# Altium footprint library FootPrintLib_10.PcbLib: 270 footprints (part 16 of 17)
Each footprint in its own frame and in the unit in brackets; x right, y up, seen from the top. Pads: shape width x height; smd on the part's side, far side on the other; paste and mask are expansions set on the pad; w line width, h text height; cw(c..) or ccw(c..) is an arc to the next point about the centre after c.
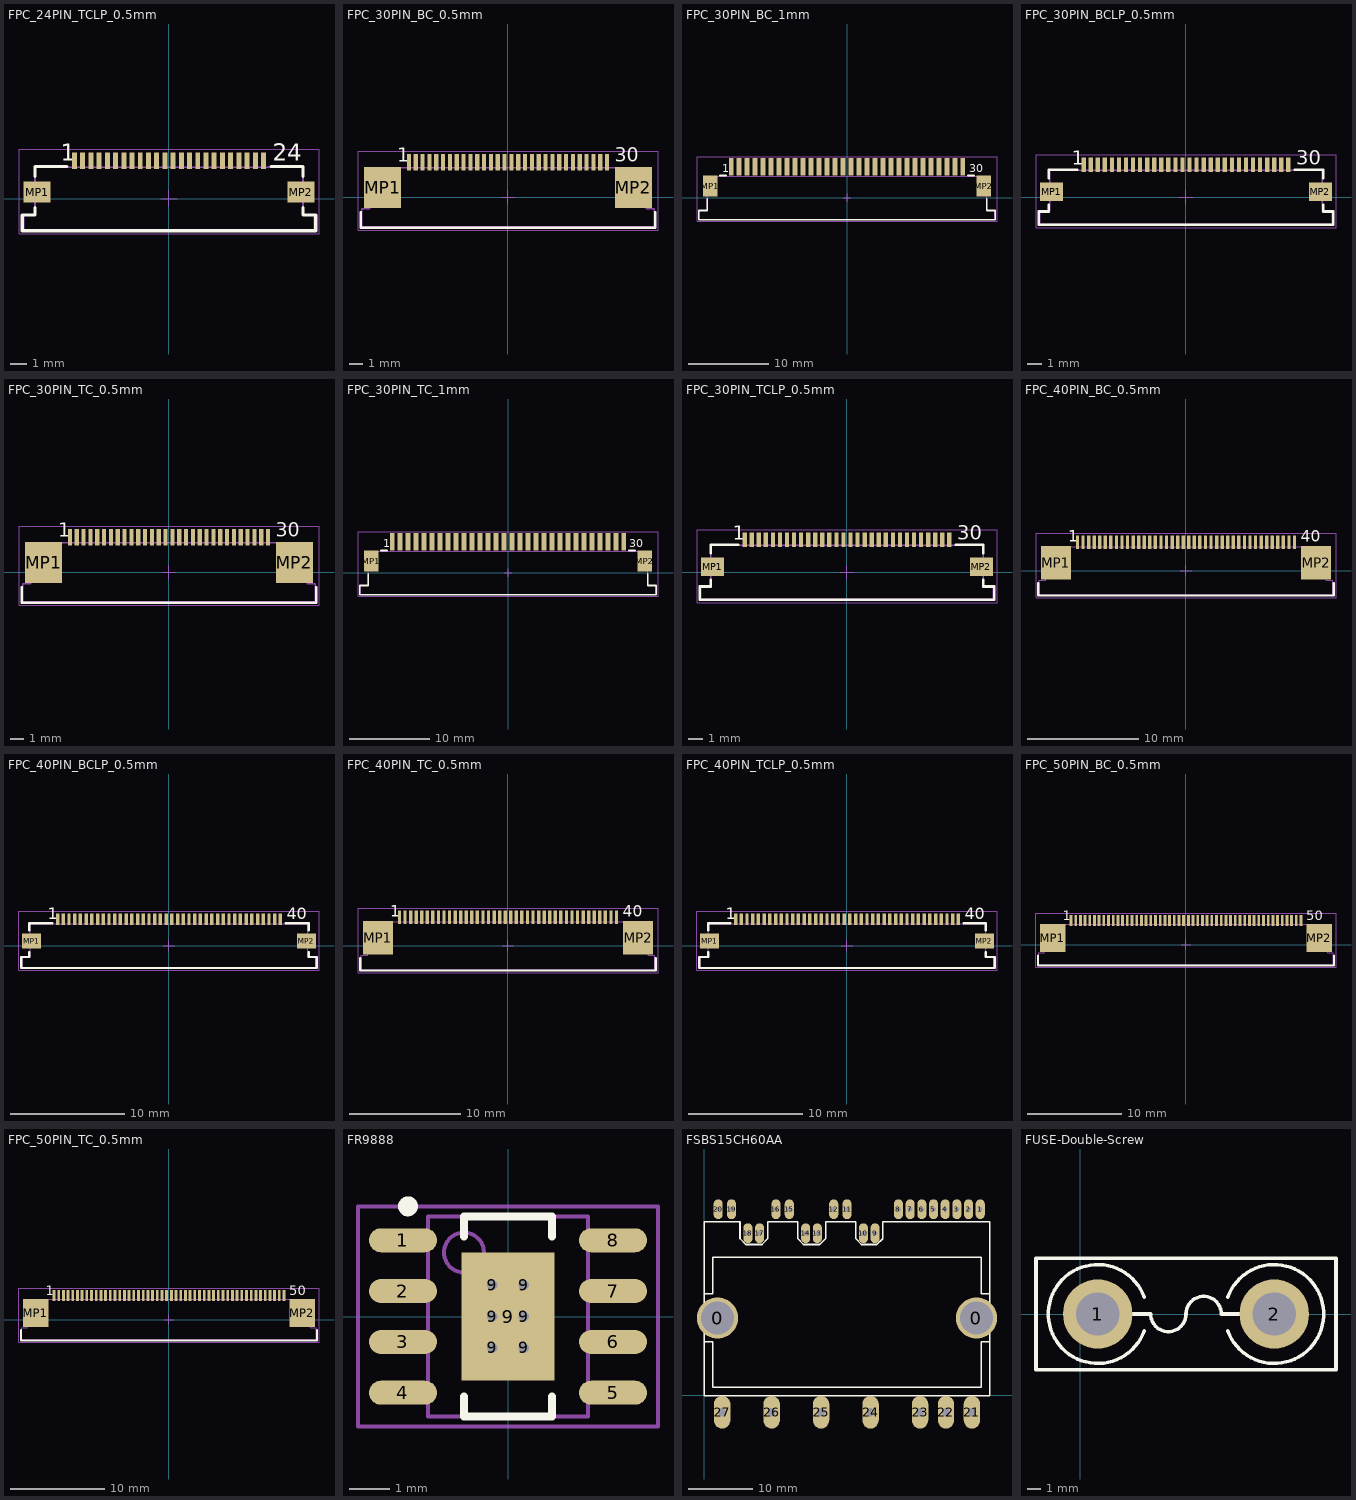
[diagram p15: the footprints below, top view; thin cyan lines are the x and y axes]

## FPC_24PIN_TCLP_0.5mm [mm] "ZIF Connectors, Horizontal, Top Contact Low Profile, pitch 0.5mm, 24p"
height 1.3
pads (26):
  rect 0.3x1 smd: 1(-5.75,2.3) 2(-5.25,2.3) 3(-4.75,2.3) 4(-4.25,2.3) 5(-3.75,2.3) 6(-3.25,2.3) 7(-2.75,2.3) 8(-2.25,2.3) 9(-1.75,2.3) 10(-1.25,2.3) 11(-0.75,2.3) 12(-0.25,2.3) 13(0.25,2.3) 14(0.75,2.3) 15(1.25,2.3) 16(1.75,2.3) 17(2.25,2.3) 18(2.75,2.3) 19(3.25,2.3) 20(3.75,2.3) 21(4.25,2.3) 22(4.75,2.3) 23(5.25,2.3) 24(5.75,2.3)
  rect 1.65x1.3 smd: MP1(-8.025,0.4) MP2(8.025,0.4)
Top Overlay:
  lines w0.2: -8.15,-0.55 -8.15,-1 -8.925,-1 -8.925,-1.95 8.925,-1.95 8.925,-1 8.15,-1 8.15,-0.55 ; -8.15,1.35 -8.15,1.95 -6.2,1.95 ; 6.2,1.95 8.15,1.95 8.15,1.35
  text "1" at -6.6,2.3 h1.02
  text "24" at 6.3,2.3 h1.02
Mechanical 13:
  lines w0.1: -8.85,-1.9 -8.85,-1 -8.15,-1 -8.15,1.9 8.15,1.9 8.15,-1 8.85,-1 8.85,-1.9 -8.85,-1.9
Mechanical 15:
  lines w0.05: -0.5,0 0.5,0 ; 0,-0.5 0,0.5 ; -9.125,-2.15 -9.125,3 9.125,3 9.125,-2.15 -9.125,-2.15
3D body "687124183622.stp": height 1.28, standoff -0.01, extent -8.85,-1.9 8.85,2.35

## FPC_30PIN_BC_0.5mm [mm] "ZIF Connectors, Horizontal, Bottom Contact, pitch 0.5mm, 30p"
height 2.25
pads (32):
  rect 0.3x1.2 smd: 1(-7.25,2.56) 2(-6.75,2.56) 3(-6.25,2.56) 4(-5.75,2.56) 5(-5.25,2.56) 6(-4.75,2.56) 7(-4.25,2.56) 8(-3.75,2.56) 9(-3.25,2.56) 10(-2.75,2.56) 11(-2.25,2.56) 12(-1.75,2.56) 13(-1.25,2.56) 14(-0.75,2.56) 15(-0.25,2.56) 16(0.25,2.56) 17(0.75,2.56) 18(1.25,2.56) 19(1.75,2.56) 20(2.25,2.56) 21(2.75,2.56) 22(3.25,2.56) 23(3.75,2.56) 24(4.25,2.56) 25(4.75,2.56) 26(5.25,2.56) 27(5.75,2.56) 28(6.25,2.56) 29(6.75,2.56) 30(7.25,2.56)
  rect 2.7x3 smd: MP1(-9.18,0.7) MP2(9.18,0.7)
Top Overlay:
  lines w0.2: -10.775,-1.125 -10.775,-2.225 10.775,-2.225 10.775,-1.125
  text "30" at 7.8,2.61 h1.02
  text "1" at -8.1,2.61 h1.02
Mechanical 13:
  lines w0.1: -10.7,-2.15 -10.7,-0.85 -10.1,-0.85 -10.1,2.15 10.1,2.15 10.1,-0.85 10.7,-0.85 10.7,-2.15 -10.7,-2.15
Mechanical 15:
  lines w0.05: -0.5,0 0.5,0 ; 0,-0.5 0,0.5 ; -10.975,-2.425 10.975,-2.425 10.975,3.36 -10.975,3.36 -10.975,-2.425
3D body "68713014522.stp": height 2.1, standoff 0, extent -10.7,-2.15 10.7,2.95

## FPC_30PIN_BC_1mm [mm] "ZIF Connectors, Horizontal, Bottom Contact, pitch 1mm, 30p"
height 3.15
pads (32):
  rect 0.6x2.2 smd: 1(-14.5,3.85) 2(-13.5,3.85) 3(-12.5,3.85) 4(-11.5,3.85) 5(-10.5,3.85) 6(-9.5,3.85) 7(-8.5,3.85) 8(-7.5,3.85) 9(-6.5,3.85) 10(-5.5,3.85) 11(-4.5,3.85) 12(-3.5,3.85) 13(-2.5,3.85) 14(-1.5,3.85) 15(-0.5,3.85) 16(0.5,3.85) 17(1.5,3.85) 18(2.5,3.85) 19(3.5,3.85) 20(4.5,3.85) 21(5.5,3.85) 22(6.5,3.85) 23(7.5,3.85) 24(8.5,3.85) 25(9.5,3.85) 26(10.5,3.85) 27(11.5,3.85) 28(12.5,3.85) 29(13.5,3.85) 30(14.5,3.85)
  rect 1.8x2.6 smd: MP1(-17.1,1.45) MP2(17.1,1.45)
Top Overlay:
  lines w0.2: -17.5,-0.15 -17.5,-1.6 -18.575,-1.6 -18.575,-2.775 18.575,-2.775 18.575,-1.6 17.5,-1.6 17.5,-0.15 ; -15.9,2.775 -15.1,2.775 ; 15.1,2.775 15.9,2.775
  text "30" at 15.3,3.2 h1.02
  text "1" at -15.6,3.2 h1.02
Mechanical 13:
  lines w0.1: -18.5,-2.7 -18.5,-1.6 -17.5,-1.6 -17.5,2.7 17.5,2.7 17.5,-1.6 18.5,-1.6 18.5,-2.7 -18.5,-2.7
Mechanical 15:
  lines w0.05: -0.5,0 0.5,0 ; 0,-0.5 0,0.5 ; -18.775,-2.975 -18.775,5.15 18.775,5.15 18.775,-2.975 -18.775,-2.975
3D body "68613014422.stp": height 3.02, standoff 0.01, extent -18.5,-2.7 18.5,4.4

## FPC_30PIN_BCLP_0.5mm [mm] "ZIF Connectors, Horizontal, Bottom Contact Low Profile, pitch 0.5mm, 30p"
height 1.3
pads (32):
  rect 0.3x1 smd: 1(-7.25,2.3) 2(-6.75,2.3) 3(-6.25,2.3) 4(-5.75,2.3) 5(-5.25,2.3) 6(-4.75,2.3) 7(-4.25,2.3) 8(-3.75,2.3) 9(-3.25,2.3) 10(-2.75,2.3) 11(-2.25,2.3) 12(-1.75,2.3) 13(-1.25,2.3) 14(-0.75,2.3) 15(-0.25,2.3) 16(0.25,2.3) 17(0.75,2.3) 18(1.25,2.3) 19(1.75,2.3) 20(2.25,2.3) 21(2.75,2.3) 22(3.25,2.3) 23(3.75,2.3) 24(4.25,2.3) 25(4.75,2.3) 26(5.25,2.3) 27(5.75,2.3) 28(6.25,2.3) 29(6.75,2.3) 30(7.25,2.3)
  rect 1.65x1.3 smd: MP1(-9.525,0.4) MP2(9.525,0.4)
Top Overlay:
  lines w0.2: -9.725,-0.55 -9.725,-1 -10.425,-1 -10.425,-1.95 10.425,-1.95 10.425,-1 9.725,-1 9.725,-0.55 ; -9.725,1.35 -9.725,1.95 -7.725,1.95 ; 7.725,1.95 9.725,1.95 9.725,1.35
  text "30" at 7.8,2.3 h1.02
  text "1" at -8.1,2.3 h1.02
Mechanical 13:
  lines w0.1: -10.35,-1.9 -10.35,-1 -9.65,-1 -9.65,1.9 9.65,1.9 9.65,-1 10.35,-1 10.35,-1.9 -10.35,-1.9
Mechanical 15:
  lines w0.05: -0.5,0 0.5,0 ; 0,-0.5 0,0.5 ; -10.625,-2.15 -10.625,3 10.625,3 10.625,-2.15 -10.625,-2.15
3D body "687130183722.stp": height 1.28, standoff -0.01, extent -10.35,-1.9 10.35,2.35

## FPC_30PIN_TC_0.5mm [mm] "ZIF Connectors, Horizontal, Top Contact, pitch 0.5mm, 30p"
height 2.25
pads (32):
  rect 0.3x1.2 smd: 1(-7.25,2.56) 2(-6.75,2.56) 3(-6.25,2.56) 4(-5.75,2.56) 5(-5.25,2.56) 6(-4.75,2.56) 7(-4.25,2.56) 8(-3.75,2.56) 9(-3.25,2.56) 10(-2.75,2.56) 11(-2.25,2.56) 12(-1.75,2.56) 13(-1.25,2.56) 14(-0.75,2.56) 15(-0.25,2.56) 16(0.25,2.56) 17(0.75,2.56) 18(1.25,2.56) 19(1.75,2.56) 20(2.25,2.56) 21(2.75,2.56) 22(3.25,2.56) 23(3.75,2.56) 24(4.25,2.56) 25(4.75,2.56) 26(5.25,2.56) 27(5.75,2.56) 28(6.25,2.56) 29(6.75,2.56) 30(7.25,2.56)
  rect 2.7x3 smd: MP1(-9.18,0.7) MP2(9.18,0.7)
Top Overlay:
  lines w0.2: -10.775,-1.1 -10.775,-2.225 10.775,-2.225 10.775,-1.1
  text "30" at 7.8,2.61 h1.02
  text "1" at -8.1,2.61 h1.02
Mechanical 13:
  lines w0.1: -10.7,-2.15 10.7,-2.15 10.7,-0.85 10.1,-0.85 10.1,2.15 -10.1,2.15 -10.1,-0.85 -10.7,-0.85 -10.7,-2.15
Mechanical 15:
  lines w0.05: -0.5,0 0.5,0 ; 0,-0.5 0,0.5 ; -10.975,-2.425 10.975,-2.425 10.975,3.36 -10.975,3.36 -10.975,-2.425
3D body "68713014022.stp": height 2.1, standoff 0, extent -10.7,-2.15 10.7,2.95

## FPC_30PIN_TC_1mm [mm] "ZIF Connectors, Horizontal, Top Contact, pitch 1mm, 30p"
height 3.15
pads (32):
  rect 0.6x2.2 smd: 1(-14.5,3.85) 2(-13.5,3.85) 3(-12.5,3.85) 4(-11.5,3.85) 5(-10.5,3.85) 6(-9.5,3.85) 7(-8.5,3.85) 8(-7.5,3.85) 9(-6.5,3.85) 10(-5.5,3.85) 11(-4.5,3.85) 12(-3.5,3.85) 13(-2.5,3.85) 14(-1.5,3.85) 15(-0.5,3.85) 16(0.5,3.85) 17(1.5,3.85) 18(2.5,3.85) 19(3.5,3.85) 20(4.5,3.85) 21(5.5,3.85) 22(6.5,3.85) 23(7.5,3.85) 24(8.5,3.85) 25(9.5,3.85) 26(10.5,3.85) 27(11.5,3.85) 28(12.5,3.85) 29(13.5,3.85) 30(14.5,3.85)
  rect 1.8x2.6 smd: MP1(-17.1,1.45) MP2(17.1,1.45)
Top Overlay:
  lines w0.2: -17.5,-0.15 -17.5,-1.6 -18.575,-1.6 -18.575,-2.775 18.575,-2.775 18.575,-1.6 17.5,-1.6 17.5,-0.15 ; -15.9,2.775 -15.1,2.775 ; 15.1,2.775 15.9,2.775
  text "30" at 15.2,3.2 h1.02
  text "1" at -15.6,3.2 h1.02
Mechanical 13:
  lines w0.1: -18.5,-2.7 -18.5,-1.6 -17.5,-1.6 -17.5,2.7 17.5,2.7 17.5,-1.6 18.5,-1.6 18.5,-2.7 -18.5,-2.7
Mechanical 15:
  lines w0.05: -0.5,0 0.5,0 ; 0,-0.5 0,0.5 ; -18.775,-2.975 18.775,-2.975 18.775,5.15 -18.775,5.15 -18.775,-2.975
3D body "68613014122.stp": height 3.02, standoff 0.02, extent -18.5,-2.7 18.5,4.4

## FPC_30PIN_TCLP_0.5mm [mm] "ZIF Connectors, Horizontal, Top Contact Low Profile, pitch 0.5mm, 30p"
height 1.3
pads (32):
  rect 0.3x1 smd: 1(-7.25,2.3) 2(-6.75,2.3) 3(-6.25,2.3) 4(-5.75,2.3) 5(-5.25,2.3) 6(-4.75,2.3) 7(-4.25,2.3) 8(-3.75,2.3) 9(-3.25,2.3) 10(-2.75,2.3) 11(-2.25,2.3) 12(-1.75,2.3) 13(-1.25,2.3) 14(-0.75,2.3) 15(-0.25,2.3) 16(0.25,2.3) 17(0.75,2.3) 18(1.25,2.3) 19(1.75,2.3) 20(2.25,2.3) 21(2.75,2.3) 22(3.25,2.3) 23(3.75,2.3) 24(4.25,2.3) 25(4.75,2.3) 26(5.25,2.3) 27(5.75,2.3) 28(6.25,2.3) 29(6.75,2.3) 30(7.25,2.3)
  rect 1.65x1.3 smd: MP1(-9.525,0.4) MP2(9.525,0.4)
Top Overlay:
  lines w0.2: -9.65,-0.55 -9.65,-1 -10.425,-1 -10.425,-1.95 10.425,-1.95 10.425,-1 9.65,-1 9.65,-0.55 ; -9.65,1.35 -9.65,1.95 -7.7,1.95 ; 7.7,1.95 9.65,1.95 9.65,1.35
  text "1" at -8.1,2.3 h1.02
  text "30" at 7.8,2.3 h1.02
Mechanical 13:
  lines w0.1: -10.35,-1.9 10.35,-1.9 10.35,-1 9.65,-1 9.65,1.9 -9.65,1.9 -9.65,-1 -10.35,-1 -10.35,-1.9
Mechanical 15:
  lines w0.05: -0.5,0 0.5,0 ; 0,-0.5 0,0.5 ; -10.625,-2.15 10.625,-2.15 10.625,3 -10.625,3 -10.625,-2.15
3D body "687130183622.stp": height 1.28, standoff -0.01, extent -10.35,-1.9 10.35,2.35

## FPC_40PIN_BC_0.5mm [mm] "ZIF Connectors, Horizontal, Bottom Contact, pitch 0.5mm, 40p"
height 2.25
pads (42):
  rect 0.3x1.2 smd: 1(-9.75,2.56) 2(-9.25,2.56) 3(-8.75,2.56) 4(-8.25,2.56) 5(-7.75,2.56) 6(-7.25,2.56) 7(-6.75,2.56) 8(-6.25,2.56) 9(-5.75,2.56) 10(-5.25,2.56) 11(-4.75,2.56) 12(-4.25,2.56) 13(-3.75,2.56) 14(-3.25,2.56) 15(-2.75,2.56) 16(-2.25,2.56) 17(-1.75,2.56) 18(-1.25,2.56) 19(-0.75,2.56) 20(-0.25,2.56) 21(0.25,2.56) 22(0.75,2.56) 23(1.25,2.56) 24(1.75,2.56) 25(2.25,2.56) 26(2.75,2.56) 27(3.25,2.56) 28(3.75,2.56) 29(4.25,2.56) 30(4.75,2.56) 31(5.25,2.56) 32(5.75,2.56) 33(6.25,2.56) 34(6.75,2.56) 35(7.25,2.56) 36(7.75,2.56) 37(8.25,2.56) 38(8.75,2.56) 39(9.25,2.56) 40(9.75,2.56)
  rect 2.7x3 smd: MP1(-11.68,0.7) MP2(11.68,0.7)
Top Overlay:
  lines w0.2: -13.275,-1.125 -13.275,-2.225 13.275,-2.225 13.275,-1.125
  text "1" at -10.6,2.61 h1.02
  text "40" at 10.3,2.61 h1.02
Mechanical 13:
  lines w0.1: -13.2,-2.15 -13.2,-0.85 -12.6,-0.85 -12.6,2.15 12.6,2.15 12.6,-0.85 13.2,-0.85 13.2,-2.15 -13.2,-2.15
Mechanical 15:
  lines w0.05: -0.5,0 0.5,0 ; 0,-0.5 0,0.5 ; -13.475,-2.425 13.475,-2.425 13.475,3.36 -13.475,3.36 -13.475,-2.425
3D body "68714014522.stp": height 2.1, standoff 0, extent -13.2,-2.15 13.2,2.95

## FPC_40PIN_BCLP_0.5mm [mm] "ZIF Connectors, Horizontal, Bottom Contact Low Profile, pitch 0.5mm, 40p"
height 1.3
pads (42):
  rect 0.3x1 smd: 1(-9.75,2.3) 2(-9.25,2.3) 3(-8.75,2.3) 4(-8.25,2.3) 5(-7.75,2.3) 6(-7.25,2.3) 7(-6.75,2.3) 8(-6.25,2.3) 9(-5.75,2.3) 10(-5.25,2.3) 11(-4.75,2.3) 12(-4.25,2.3) 13(-3.75,2.3) 14(-3.25,2.3) 15(-2.75,2.3) 16(-2.25,2.3) 17(-1.75,2.3) 18(-1.25,2.3) 19(-0.75,2.3) 20(-0.25,2.3) 21(0.25,2.3) 22(0.75,2.3) 23(1.25,2.3) 24(1.75,2.3) 25(2.25,2.3) 26(2.75,2.3) 27(3.25,2.3) 28(3.75,2.3) 29(4.25,2.3) 30(4.75,2.3) 31(5.25,2.3) 32(5.75,2.3) 33(6.25,2.3) 34(6.75,2.3) 35(7.25,2.3) 36(7.75,2.3) 37(8.25,2.3) 38(8.75,2.3) 39(9.25,2.3) 40(9.75,2.3)
  rect 1.65x1.3 smd: MP1(-12.025,0.4) MP2(12.025,0.4)
Top Overlay:
  lines w0.2: -12.225,-0.55 -12.225,-1 -12.925,-1 -12.925,-1.95 12.925,-1.95 12.925,-1 12.225,-1 12.225,-0.55 ; -12.225,1.35 -12.225,1.95 -10.225,1.95 ; 10.225,1.95 12.225,1.95 12.225,1.35
  text "1" at -10.6,2.3 h1.02
  text "40" at 10.3,2.3 h1.02
Mechanical 13:
  lines w0.1: -12.85,-1.9 -12.85,-1 -12.15,-1 -12.15,1.9 12.15,1.9 12.15,-1 12.85,-1 12.85,-1.9 -12.85,-1.9
Mechanical 15:
  lines w0.05: -0.5,0 0.5,0 ; 0,-0.5 0,0.5 ; -13.125,-2.15 -13.125,3 13.125,3 13.125,-2.15 -13.125,-2.15
3D body "687140183722.stp": height 1.28, standoff -0.01, extent -12.85,-1.9 12.85,2.35

## FPC_40PIN_TC_0.5mm [mm] "ZIF Connectors, Horizontal, Top Contact, pitch 0.5mm, 40p"
height 2.25
pads (42):
  rect 0.3x1.2 smd: 1(-9.75,2.56) 2(-9.25,2.56) 3(-8.75,2.56) 4(-8.25,2.56) 5(-7.75,2.56) 6(-7.25,2.56) 7(-6.75,2.56) 8(-6.25,2.56) 9(-5.75,2.56) 10(-5.25,2.56) 11(-4.75,2.56) 12(-4.25,2.56) 13(-3.75,2.56) 14(-3.25,2.56) 15(-2.75,2.56) 16(-2.25,2.56) 17(-1.75,2.56) 18(-1.25,2.56) 19(-0.75,2.56) 20(-0.25,2.56) 21(0.25,2.56) 22(0.75,2.56) 23(1.25,2.56) 24(1.75,2.56) 25(2.25,2.56) 26(2.75,2.56) 27(3.25,2.56) 28(3.75,2.56) 29(4.25,2.56) 30(4.75,2.56) 31(5.25,2.56) 32(5.75,2.56) 33(6.25,2.56) 34(6.75,2.56) 35(7.25,2.56) 36(7.75,2.56) 37(8.25,2.56) 38(8.75,2.56) 39(9.25,2.56) 40(9.75,2.56)
  rect 2.7x3 smd: MP1(-11.68,0.7) MP2(11.68,0.7)
Top Overlay:
  lines w0.2: -13.275,-1.1 -13.275,-2.225 13.275,-2.225 13.275,-1.1
  text "1" at -10.6,2.61 h1.02
  text "40" at 10.3,2.61 h1.02
Mechanical 13:
  lines w0.1: -13.2,-2.15 13.2,-2.15 13.2,-0.85 12.6,-0.85 12.6,2.15 -12.6,2.15 -12.6,-0.85 -13.2,-0.85 -13.2,-2.15
Mechanical 15:
  lines w0.05: -0.5,0 0.5,0 ; 0,-0.5 0,0.5 ; -13.475,-2.425 13.475,-2.425 13.475,3.36 -13.475,3.36 -13.475,-2.425
3D body "68714014022.stp": height 2.1, standoff 0, extent -13.2,-2.15 13.2,2.95

## FPC_40PIN_TCLP_0.5mm [mm] "ZIF Connectors, Horizontal, Top Contact Low Profile, pitch 0.5mm, 40p"
height 1.3
pads (42):
  rect 0.3x1 smd: 1(-9.75,2.3) 2(-9.25,2.3) 3(-8.75,2.3) 4(-8.25,2.3) 5(-7.75,2.3) 6(-7.25,2.3) 7(-6.75,2.3) 8(-6.25,2.3) 9(-5.75,2.3) 10(-5.25,2.3) 11(-4.75,2.3) 12(-4.25,2.3) 13(-3.75,2.3) 14(-3.25,2.3) 15(-2.75,2.3) 16(-2.25,2.3) 17(-1.75,2.3) 18(-1.25,2.3) 19(-0.75,2.3) 20(-0.25,2.3) 21(0.25,2.3) 22(0.75,2.3) 23(1.25,2.3) 24(1.75,2.3) 25(2.25,2.3) 26(2.75,2.3) 27(3.25,2.3) 28(3.75,2.3) 29(4.25,2.3) 30(4.75,2.3) 31(5.25,2.3) 32(5.75,2.3) 33(6.25,2.3) 34(6.75,2.3) 35(7.25,2.3) 36(7.75,2.3) 37(8.25,2.3) 38(8.75,2.3) 39(9.25,2.3) 40(9.75,2.3)
  rect 1.65x1.3 smd: MP1(-12.025,0.4) MP2(12.025,0.4)
Top Overlay:
  lines w0.2: -12.15,-0.55 -12.15,-1 -12.925,-1 -12.925,-1.95 12.925,-1.95 12.925,-1 12.15,-1 12.15,-0.55 ; -12.15,1.35 -12.15,1.95 -10.2,1.95 ; 10.2,1.95 12.15,1.95 12.15,1.35
  text "40" at 10.3,2.3 h1.02
  text "1" at -10.6,2.3 h1.02
Mechanical 13:
  lines w0.1: -12.85,-1.9 -12.85,-1 -12.15,-1 -12.15,1.9 12.15,1.9 12.15,-1 12.85,-1 12.85,-1.9 -12.85,-1.9
Mechanical 15:
  lines w0.05: -0.5,0 0.5,0 ; 0,-0.5 0,0.5 ; -13.125,-2.15 -13.125,3 13.125,3 13.125,-2.15 -13.125,-2.15
3D body "687140183622.stp": height 1.28, standoff -0.01, extent -12.85,-1.9 12.85,2.35

## FPC_50PIN_BC_0.5mm [mm] "ZIF Connectors, Horizontal, Bottom Contact, pitch 0.5mm, 50p"
height 2.25
pads (52):
  rect 0.3x1.2 smd: 1(-12.25,2.56) 2(-11.75,2.56) 3(-11.25,2.56) 4(-10.75,2.56) 5(-10.25,2.56) 6(-9.75,2.56) 7(-9.25,2.56) 8(-8.75,2.56) 9(-8.25,2.56) 10(-7.75,2.56) 11(-7.25,2.56) 12(-6.75,2.56) 13(-6.25,2.56) 14(-5.75,2.56) 15(-5.25,2.56) 16(-4.75,2.56) 17(-4.25,2.56) 18(-3.75,2.56) 19(-3.25,2.56) 20(-2.75,2.56) 21(-2.25,2.56) 22(-1.75,2.56) 23(-1.25,2.56) 24(-0.75,2.56) 25(-0.25,2.56) 26(0.25,2.56) 27(0.75,2.56) 28(1.25,2.56) 29(1.75,2.56) 30(2.25,2.56) 31(2.75,2.56) 32(3.25,2.56) 33(3.75,2.56) 34(4.25,2.56) 35(4.75,2.56) 36(5.25,2.56) 37(5.75,2.56) 38(6.25,2.56) 39(6.75,2.56) 40(7.25,2.56) 41(7.75,2.56) 42(8.25,2.56) 43(8.75,2.56) 44(9.25,2.56) 45(9.75,2.56) 46(10.25,2.56) 47(10.75,2.56) 48(11.25,2.56) 49(11.75,2.56) 50(12.25,2.56)
  rect 2.7x3 smd: MP1(-14.18,0.7) MP2(14.18,0.7)
Top Overlay:
  lines w0.2: -15.775,-1.125 -15.775,-2.225 15.775,-2.225 15.775,-1.125
  text "1" at -13.1,2.61 h1.02
  text "50" at 12.8,2.61 h1.02
Mechanical 13:
  lines w0.1: -15.7,-2.15 -15.7,-0.85 -15.1,-0.85 -15.1,2.15 15.1,2.15 15.1,-0.85 15.7,-0.85 15.7,-2.15 -15.7,-2.15
Mechanical 15:
  lines w0.05: -0.5,0 0.5,0 ; 0,-0.5 0,0.5 ; -15.975,-2.425 15.975,-2.425 15.975,3.36 -15.975,3.36 -15.975,-2.425
3D body "68715014522.stp": height 2.1, standoff 0, extent -15.7,-2.15 15.7,2.95

## FPC_50PIN_TC_0.5mm [mm] "ZIF Connectors, Horizontal, Top Contact, pitch 0.5mm, 50p"
height 2.25
pads (52):
  rect 0.3x1.2 smd: 1(-12.25,2.56) 2(-11.75,2.56) 3(-11.25,2.56) 4(-10.75,2.56) 5(-10.25,2.56) 6(-9.75,2.56) 7(-9.25,2.56) 8(-8.75,2.56) 9(-8.25,2.56) 10(-7.75,2.56) 11(-7.25,2.56) 12(-6.75,2.56) 13(-6.25,2.56) 14(-5.75,2.56) 15(-5.25,2.56) 16(-4.75,2.56) 17(-4.25,2.56) 18(-3.75,2.56) 19(-3.25,2.56) 20(-2.75,2.56) 21(-2.25,2.56) 22(-1.75,2.56) 23(-1.25,2.56) 24(-0.75,2.56) 25(-0.25,2.56) 26(0.25,2.56) 27(0.75,2.56) 28(1.25,2.56) 29(1.75,2.56) 30(2.25,2.56) 31(2.75,2.56) 32(3.25,2.56) 33(3.75,2.56) 34(4.25,2.56) 35(4.75,2.56) 36(5.25,2.56) 37(5.75,2.56) 38(6.25,2.56) 39(6.75,2.56) 40(7.25,2.56) 41(7.75,2.56) 42(8.25,2.56) 43(8.75,2.56) 44(9.25,2.56) 45(9.75,2.56) 46(10.25,2.56) 47(10.75,2.56) 48(11.25,2.56) 49(11.75,2.56) 50(12.25,2.56)
  rect 2.7x3 smd: MP1(-14.18,0.7) MP2(14.18,0.7)
Top Overlay:
  lines w0.2: -15.775,-1.1 -15.775,-2.225 15.775,-2.225 15.775,-1.1
  text "50" at 12.8,2.61 h1.02
  text "1" at -13.1,2.61 h1.02
Mechanical 13:
  lines w0.1: -15.7,-2.15 -15.7,-0.85 -15.1,-0.85 -15.1,2.15 15.1,2.15 15.1,-0.85 15.7,-0.85 15.7,-2.15 -15.7,-2.15
Mechanical 15:
  lines w0.05: -0.5,0 0.5,0 ; 0,-0.5 0,0.5 ; -15.975,-2.425 -15.975,3.36 15.975,3.36 15.975,-2.425 -15.975,-2.425
3D body "68715014022.stp": height 2.1, standoff 0, extent -15.7,-2.15 15.7,2.95

## FR9888 [mil] "FR9888 SOP8 With Pad"
height 59.06
pads (15):
  oval 66.93x23.62 smd: 1(-103.43,75) 2(-103.43,25) 3(-103.43,-25) 4(-103.43,-75) 5(103.42,-75) 6(103.42,-25) 7(103.42,25) 8(103.42,75)
  round 20 / inner round 60 / far side round 20 hole 10: 9(-15.5,-31) 9(-15.5,0) 9(-15.5,31) 9(15.5,-31) 9(15.5,0) 9(15.5,31)
  rect 91.06x126.06 smd paste-60.04: 9(0,0)
Top Overlay:
  circle w9.84: c-98.43,108.46 r4.92
  lines w7.87: -43.31,-78.74 -43.31,-98.43 43.31,-98.43 43.31,-78.74 ; -43.31,78.74 -43.31,98.43 43.31,98.43 43.31,78.74
Top Paste:
  region: -39.37,-34.94 -39.37,-57.09 -19.44,-57.09 -19.44,-40.5 -25,-34.94
  region: -11.56,-40.5 -11.56,-57.09 11.56,-57.09 11.56,-40.5 6,-34.94 -6,-34.94
  region: 19.44,-40.5 19.44,-57.09 39.37,-57.09 39.37,-34.94 25,-34.94
  region: -39.37,-3.94 -39.37,-27.06 -25,-27.06 -19.44,-21.5 -19.44,-9.5 -25,-3.94
  region: -11.56,-9.5 -11.56,-21.5 -6,-27.06 6,-27.06 11.56,-21.5 11.56,-9.5 6,-3.94 -6,-3.94
  region: 19.44,-9.5 19.44,-21.5 25,-27.06 39.37,-27.06 39.37,-3.94 25,-3.94
  region: -39.37,27.06 -39.37,3.94 -25,3.94 -19.44,9.5 -19.44,21.5 -25,27.06
  region: -11.56,21.5 -11.56,9.5 -6,3.94 6,3.94 11.56,9.5 11.56,21.5 6,27.06 -6,27.06
  region: 19.44,21.5 19.44,9.5 25,3.94 39.37,3.94 39.37,27.06 25,27.06
  region: -39.37,57.09 -39.37,34.94 -25,34.94 -19.44,40.5 -19.44,57.09
  region: -11.56,57.09 -11.56,40.5 -6,34.94 6,34.94 11.56,40.5 11.56,57.09
  region: 19.44,57.09 19.44,40.5 25,34.94 39.37,34.94 39.37,57.09
Mechanical 13:
  circle w3.94: c-43.31,62.99 r19.68
  lines w3.94: -78.74,-98.43 -78.74,98.43 78.74,98.43 78.74,-98.43 -78.74,-98.43
Mechanical 15:
  lines w3.94: -19.68,0 19.68,0 ; 0,-19.68 0,19.68 ; -147.64,-108.27 -147.64,108.27 147.64,108.27 147.64,-108.27 -147.64,-108.27
3D body "User Library-SOP-8.step": height 57, standoff 0, extent -115,-96 112.49,97

## FSBS15CH60AA [mil]
pads (29):
  round 250 hole 200: 0(80,470) 0(1650,470)
  oval 55x120 hole 30: 1(1673.23,1129.92) 2(1602.36,1129.92) 3(1531.5,1129.92) 4(1460.63,1129.92) 5(1389.76,1129.92) 6(1318.9,1129.92) 7(1248.03,1129.92) 8(1177.17,1129.92) 9(1035.43,984.25) 10(964.57,984.25) 11(865.16,1129.92) 12(784.45,1129.92) 13(685.04,984.25) 14(614.17,984.25) 15(514.76,1129.92) 16(434.06,1129.92) 17(334.65,984.25) 18(263.78,984.25) 19(164.37,1129.92) 20(83.66,1129.92)
  oval 100x200 hole 50: 21(1623.03,-101.38) 22(1465.55,-101.38) 23(1308.07,-101.38) 24(1007.87,-101.38) 25(707.68,-101.38) 26(407.48,-101.38) 27(107.28,-101.38)
Top Overlay:
  lines w10: -0.98,325.79 50.2,325.79 50.2,50.2 1680.12,50.2 1680.12,325.79 1731.3,325.79 ; -0.98,617.13 50.2,617.13 50.2,837.6 1680.12,837.6 1680.12,617.13 1731.3,617.13 ; -0.98,-0.98 -0.98,404.53 77.76,404.53 ccw(c77.76,471.46) 77.76,538.38 -0.98,538.38 -0.98,1054.13 215.55,1054.13 215.55,951.77 250.98,916.34 349.41,916.34 384.84,951.77 384.84,1054.13 565.94,1054.13 565.94,951.77 601.38,916.34 699.8,916.34 735.24,951.77 735.24,1054.13 917.32,1054.13 917.32,951.77 952.76,916.34 1046.26,916.34 1082.68,950.79 1082.68,1054.13 1731.3,1054.13 1731.3,538.38 1652.56,538.39 ccw(c1652.56,471.46) 1652.56,404.53 1731.3,404.53 1731.3,-0.98 -0.98,-0.98

## FUSE-Double-Screw [mm]
pads (2):
  round 5 hole 3.1: 1(1.27,0) 2(13.97,0)
Top Overlay:
  lines w0.254: 2.54,0 5.08,0 ccw(c6.35,0) 7.62,0 cw(c8.89,0) 10.16,0 12.7,0 ; 4.612,-1.216 cw(c1.27,0) 4.612,1.216 ; 10.628,-1.216 ccw(c13.97,0) 10.628,1.216 ; -3.175,-4 18.415,-4 18.415,4 -3.175,4 -3.175,-4